# Altium footprint library WR-TBL_Pluggable Connector_3.81mm.PcbLib: 201 footprints (part 7 of 13)
Each footprint in its own frame and in the unit in brackets; x right, y up, seen from the top. Pads: shape width x height; smd on the part's side, far side on the other; paste and mask are expansions set on the pad; w line width, h text height; cw(c..) or ccw(c..) is an arc to the next point about the centre after c.
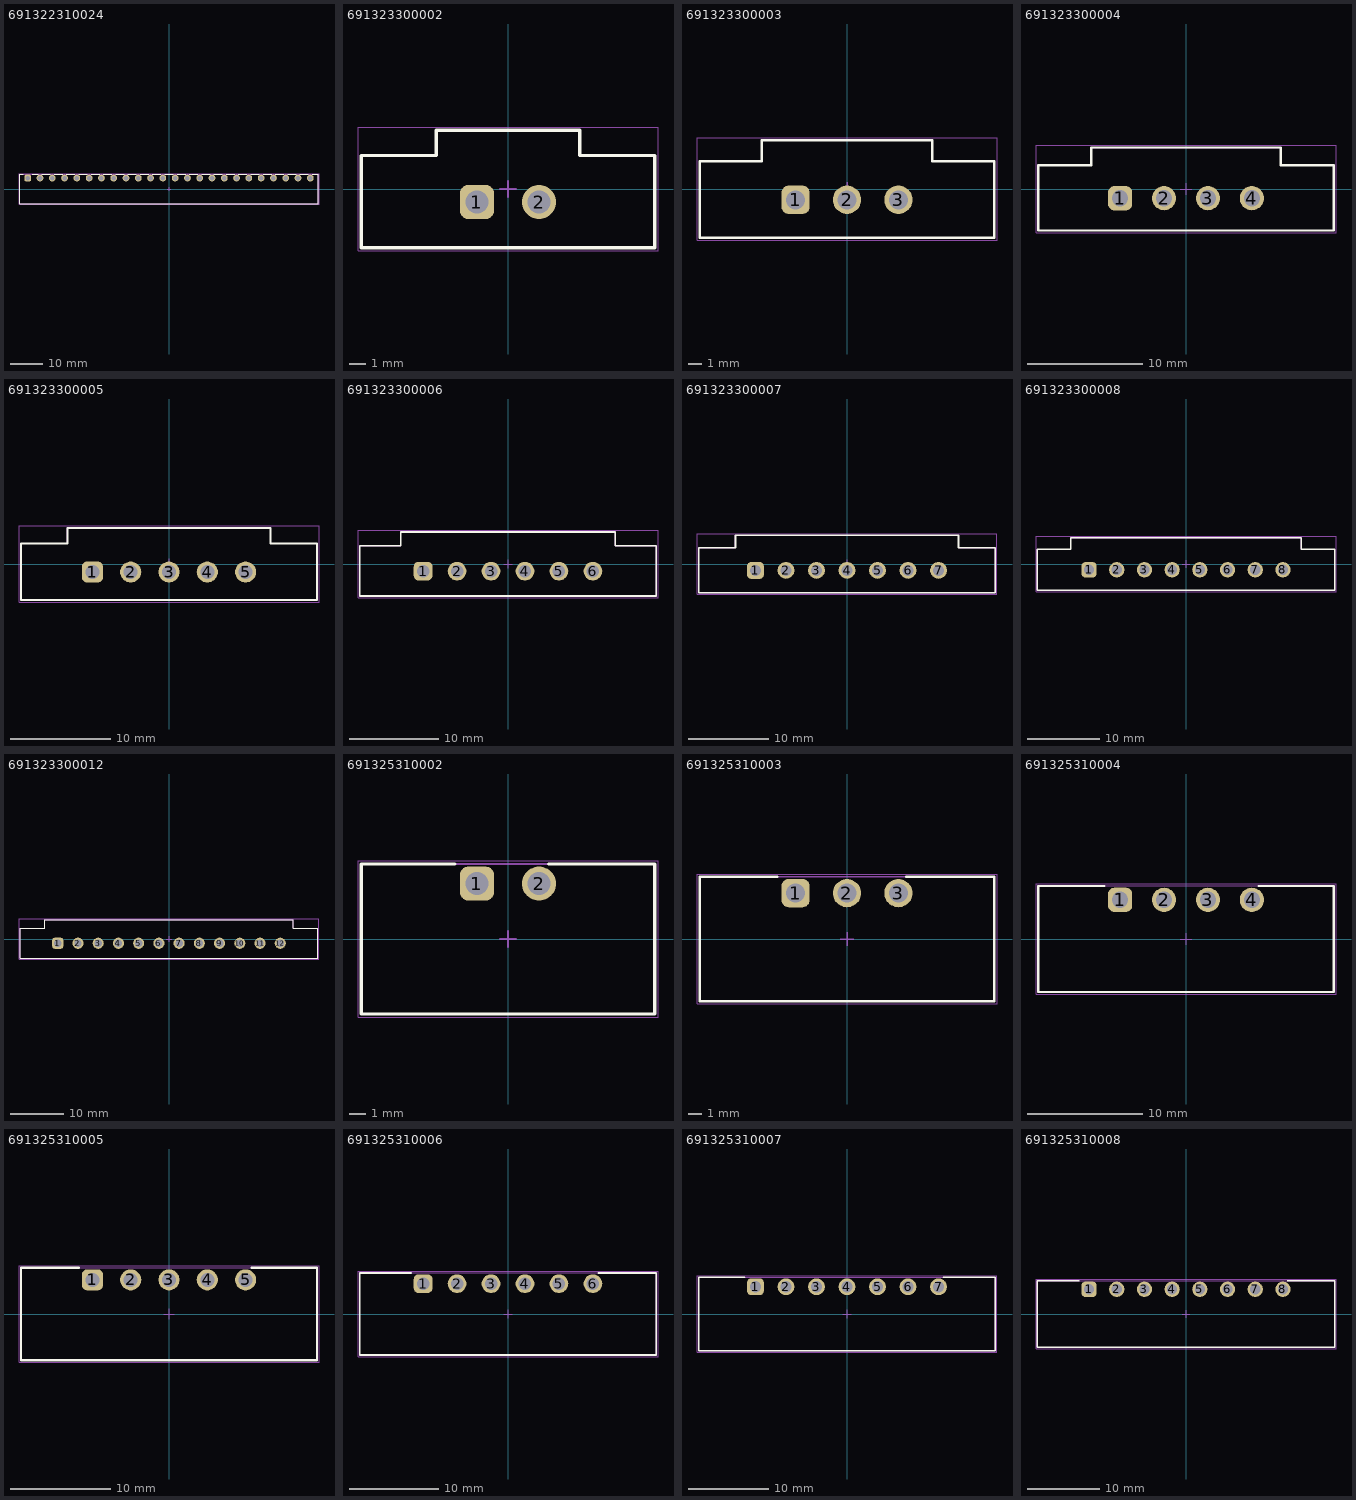
[diagram p6: the footprints below, top view; thin cyan lines are the x and y axes]

## 691322310024 [mm] "Horizontal PCB Header, pitch 3.81mm, 24p"
height 7
pads (24):
  rrect50% 2.1x2.1 hole 1.4: 1(-43.815,3.4)
  round 2.1 hole 1.4: 2(-40.005,3.4) 3(-36.195,3.4) 4(-32.385,3.4) 5(-28.575,3.4) 6(-24.765,3.4) 7(-20.955,3.4) 8(-17.145,3.4) 9(-13.335,3.4) 10(-9.525,3.4) 11(-5.715,3.4) 12(-1.905,3.4) 13(1.905,3.4) 14(5.715,3.4) 15(9.525,3.4) 16(13.335,3.4) 17(17.145,3.4) 18(20.955,3.4) 19(24.765,3.4) 20(28.575,3.4) 21(32.385,3.4) 22(36.195,3.4) 23(40.005,3.4) 24(43.815,3.4)
Top Overlay:
  lines w0.2: -45.165,4.6 -46.315,4.6 -46.315,-4.6 46.315,-4.6 46.315,4.6 44.405,4.6 ; -42.465,4.6 -40.595,4.6 ; -39.415,4.6 -36.785,4.6 ; -35.605,4.6 -32.975,4.6 ; -31.795,4.6 -29.165,4.6 ; -27.985,4.6 -25.355,4.6 ; -24.175,4.6 -21.545,4.6 ; -20.365,4.6 -17.735,4.6 ; -16.555,4.6 -13.925,4.6 ; -12.745,4.6 -10.115,4.6 ; -8.935,4.6 -6.305,4.6 ; -5.125,4.6 -2.495,4.6 ; -1.315,4.6 1.315,4.6 ; 2.495,4.6 5.125,4.6 ; 6.305,4.6 8.935,4.6 ; 10.115,4.6 12.745,4.6 ; 13.925,4.6 16.555,4.6 ; 17.735,4.6 20.365,4.6 ; 21.545,4.6 24.175,4.6 ; 25.355,4.6 27.985,4.6 ; 29.165,4.6 31.795,4.6 ; 32.975,4.6 35.605,4.6 ; 36.785,4.6 39.415,4.6 ; 40.595,4.6 43.225,4.6
Top Assembly:
  lines w0.1: -46.315,-4.6 46.315,-4.6 46.315,4.6 -46.315,4.6 -46.315,-4.6
Top Designator:
  text ".Designator" at -3.647,-0.357 h1
Top 3D Body:
  lines w0.1: -46.315,-4.6 -46.315,4.6 46.315,4.6 46.315,-4.6 -46.315,-4.6
Top Courtyard:
  lines w0.05: -46.515,-4.8 46.515,-4.8 46.515,4.8 -46.515,4.8 -46.515,-4.8
Top Component Center:
  lines w0.1: -0.5,0 0.5,0 ; 0,-0.5 0,0.5
3D body "691322310024.stp": height 7.25, standoff -3.45, extent -46.315,-4.6 46.315,4.6

## 691323300002 [mm] "Vertical PCB Header with Flanges, pitch 3.81mm, 02p"
height 9.2
pads (2):
  rrect50% 2.1x2.1 hole 1.4: 1(-1.905,-0.8)
  round 2.1 hole 1.4: 2(1.905,-0.8)
Top Overlay:
  lines w0.2: -9.005,-3.6 -9.005,2.05 -4.4,2.05 -4.4,3.6 4.4,3.6 4.4,2.05 9.005,2.05 9.005,-3.6 -9.005,-3.6
Top Assembly:
  lines w0.1: -9.005,-3.6 9.005,-3.6 9.005,2.05 4.4,2.05 4.4,3.6 -4.4,3.6 -4.4,2.05 -9.005,2.05 -9.005,-3.6
Top Designator:
  text ".Designator" at -3.647,-0.357 h1
Top 3D Body:
  lines w0.1: -9.005,-3.6 -9.005,2.05 -4.4,2.05 -4.4,3.6 4.4,3.6 4.4,2.05 9.005,2.05 9.005,-3.6 -9.005,-3.6
Top Courtyard:
  lines w0.05: -9.205,-3.8 -9.205,3.8 9.205,3.8 9.205,-3.8 -9.205,-3.8
Top Component Center:
  lines w0.1: -0.5,0 0.5,0 ; 0,-0.5 0,0.5
3D body "691323300002.stp": height 9.25, standoff -3.45, extent -9.005,-3.6 9.005,3.6

## 691323300003 [mm] "Vertical PCB Header with Flanges, pitch 3.81mm, 03p"
height 9.2
pads (3):
  rrect50% 2.1x2.1 hole 1.4: 1(-3.81,-0.8)
  round 2.1 hole 1.4: 2(0,-0.8) 3(3.81,-0.8)
Top Overlay:
  lines w0.2: -10.91,-3.6 10.91,-3.6 10.91,2.05 6.305,2.05 6.305,3.6 -6.305,3.6 -6.305,2.05 -10.91,2.05 -10.91,-3.6
Top Assembly:
  lines w0.1: -10.91,-3.6 -10.91,2.05 -6.305,2.05 -6.305,3.6 6.305,3.6 6.305,2.05 10.91,2.05 10.91,-3.6 -10.91,-3.6
Top Designator:
  text ".Designator" at -3.647,-0.357 h1
Top 3D Body:
  lines w0.1: -10.91,-3.6 10.91,-3.6 10.91,2.05 6.305,2.05 6.305,3.6 -6.305,3.6 -6.305,2.05 -10.91,2.05 -10.91,-3.6
Top Courtyard:
  lines w0.05: -11.11,-3.8 11.11,-3.8 11.11,3.8 -11.11,3.8 -11.11,-3.8
Top Component Center:
  lines w0.1: -0.5,0 0.5,0 ; 0,-0.5 0,0.5
3D body "691323300003.stp": height 9.25, standoff -3.45, extent -10.91,-3.6 10.91,3.6

## 691323300004 [mm] "Vertical PCB Header with Flanges, pitch 3.81mm, 04p"
height 9.2
pads (4):
  rrect50% 2.1x2.1 hole 1.4: 1(-5.715,-0.8)
  round 2.1 hole 1.4: 2(-1.905,-0.8) 3(1.905,-0.8) 4(5.715,-0.8)
Top Overlay:
  lines w0.2: -12.815,-3.6 12.815,-3.6 12.815,2.05 8.21,2.05 8.21,3.6 -8.21,3.6 -8.21,2.05 -12.815,2.05 -12.815,-3.6
Top Assembly:
  lines w0.1: -12.815,-3.6 -12.815,2.05 -8.21,2.05 -8.21,3.6 8.21,3.6 8.21,2.05 12.815,2.05 12.815,-3.6 -12.815,-3.6
Top Designator:
  text ".Designator" at -3.647,-0.357 h1
Top 3D Body:
  lines w0.1: -12.815,-3.6 12.815,-3.6 12.815,2.05 8.21,2.05 8.21,3.6 -8.21,3.6 -8.21,2.05 -12.815,2.05 -12.815,-3.6
Top Courtyard:
  lines w0.05: -13.015,-3.8 13.015,-3.8 13.015,3.8 -13.015,3.8 -13.015,-3.8
Top Component Center:
  lines w0.1: -0.5,0 0.5,0 ; 0,-0.5 0,0.5
3D body "691323300004.stp": height 9.25, standoff -3.45, extent -12.815,-3.6 12.815,3.6

## 691323300005 [mm] "Vertical PCB Header with Flanges, pitch 3.81mm, 05p"
height 9.2
pads (5):
  rrect50% 2.1x2.1 hole 1.4: 1(-7.62,-0.8)
  round 2.1 hole 1.4: 2(-3.81,-0.8) 3(0,-0.8) 4(3.81,-0.8) 5(7.62,-0.8)
Top Overlay:
  lines w0.2: -14.72,-3.6 14.72,-3.6 14.72,2.05 10.115,2.05 10.115,3.6 -10.115,3.6 -10.115,2.05 -14.72,2.05 -14.72,-3.6
Top Assembly:
  lines w0.1: -14.72,-3.6 -14.72,2.05 -10.115,2.05 -10.115,3.6 10.115,3.6 10.115,2.05 14.72,2.05 14.72,-3.6 -14.72,-3.6
Top Designator:
  text ".Designator" at -3.647,-0.357 h1
Top 3D Body:
  lines w0.1: -14.72,-3.6 14.72,-3.6 14.72,2.05 10.115,2.05 10.115,3.6 -10.115,3.6 -10.115,2.05 -14.72,2.05 -14.72,-3.6
Top Courtyard:
  lines w0.05: -14.92,-3.8 14.92,-3.8 14.92,3.8 -14.92,3.8 -14.92,-3.8
Top Component Center:
  lines w0.1: -0.5,0 0.5,0 ; 0,-0.5 0,0.5
3D body "691323300005.stp": height 9.25, standoff -3.45, extent -14.72,-3.6 14.72,3.6

## 691323300006 [mm] "Vertical PCB Header with Flanges, pitch 3.81mm, 06p"
height 9.2
pads (6):
  rrect50% 2.1x2.1 hole 1.4: 1(-9.525,-0.8)
  round 2.1 hole 1.4: 2(-5.715,-0.8) 3(-1.905,-0.8) 4(1.905,-0.8) 5(5.715,-0.8) 6(9.525,-0.8)
Top Overlay:
  lines w0.2: -16.625,-3.6 16.625,-3.6 16.625,2.05 12.02,2.05 12.02,3.6 -12.02,3.6 -12.02,2.05 -16.625,2.05 -16.625,-3.6
Top Assembly:
  lines w0.1: -16.625,-3.6 -16.625,2.05 -12.02,2.05 -12.02,3.6 12.02,3.6 12.02,2.05 16.625,2.05 16.625,-3.6 -16.625,-3.6
Top Designator:
  text ".Designator" at -3.647,-0.357 h1
Top 3D Body:
  lines w0.1: -16.625,-3.6 16.625,-3.6 16.625,2.05 12.02,2.05 12.02,3.6 -12.02,3.6 -12.02,2.05 -16.625,2.05 -16.625,-3.6
Top Courtyard:
  lines w0.05: -16.825,-3.8 16.825,-3.8 16.825,3.8 -16.825,3.8 -16.825,-3.8
Top Component Center:
  lines w0.1: -0.5,0 0.5,0 ; 0,-0.5 0,0.5
3D body "691323300006.stp": height 9.25, standoff -3.45, extent -16.625,-3.6 16.625,3.6

## 691323300007 [mm] "Vertical PCB Header with Flanges, pitch 3.81mm, 07p"
height 9.2
pads (7):
  rrect50% 2.1x2.1 hole 1.4: 1(-11.43,-0.8)
  round 2.1 hole 1.4: 2(-7.62,-0.8) 3(-3.81,-0.8) 4(0,-0.8) 5(3.81,-0.8) 6(7.62,-0.8) 7(11.43,-0.8)
Top Overlay:
  lines w0.2: -18.53,-3.6 18.53,-3.6 18.53,2.05 13.925,2.05 13.925,3.6 -13.925,3.6 -13.925,2.05 -18.53,2.05 -18.53,-3.6
Top Assembly:
  lines w0.1: -18.53,-3.6 -18.53,2.05 -13.925,2.05 -13.925,3.6 13.925,3.6 13.925,2.05 18.53,2.05 18.53,-3.6 -18.53,-3.6
Top Designator:
  text ".Designator" at -3.647,-0.357 h1
Top 3D Body:
  lines w0.1: -18.53,-3.6 18.53,-3.6 18.53,2.05 13.925,2.05 13.925,3.6 -13.925,3.6 -13.925,2.05 -18.53,2.05 -18.53,-3.6
Top Courtyard:
  lines w0.05: -18.73,-3.8 18.73,-3.8 18.73,3.8 -18.73,3.8 -18.73,-3.8
Top Component Center:
  lines w0.1: -0.5,0 0.5,0 ; 0,-0.5 0,0.5
3D body "691323300007.stp": height 9.25, standoff -3.45, extent -18.53,-3.6 18.53,3.6

## 691323300008 [mm] "Vertical PCB Header with Flanges, pitch 3.81mm, 08p"
height 9.2
pads (8):
  rrect50% 2.1x2.1 hole 1.4: 1(-13.335,-0.8)
  round 2.1 hole 1.4: 2(-9.525,-0.8) 3(-5.715,-0.8) 4(-1.905,-0.8) 5(1.905,-0.8) 6(5.715,-0.8) 7(9.525,-0.8) 8(13.335,-0.8)
Top Overlay:
  lines w0.2: -20.435,-3.6 -20.435,2.05 -15.83,2.05 -15.83,3.6 15.83,3.6 15.83,2.05 20.435,2.05 20.435,-3.6 -20.435,-3.6
Top Assembly:
  lines w0.1: -20.435,-3.6 20.435,-3.6 20.435,2.05 15.83,2.05 15.83,3.6 -15.83,3.6 -15.83,2.05 -20.435,2.05 -20.435,-3.6
Top Designator:
  text ".Designator" at -3.647,-0.357 h1
Top 3D Body:
  lines w0.1: -20.435,-3.6 -20.435,2.05 -15.83,2.05 -15.83,3.6 15.83,3.6 15.83,2.05 20.435,2.05 20.435,-3.6 -20.435,-3.6
Top Courtyard:
  lines w0.05: -20.635,-3.8 -20.635,3.8 20.635,3.8 20.635,-3.8 -20.635,-3.8
Top Component Center:
  lines w0.1: -0.5,0 0.5,0 ; 0,-0.5 0,0.5
3D body "691323300008.stp": height 9.25, standoff -3.45, extent -20.435,-3.6 20.435,3.6

## 691323300012 [mm] "Vertical PCB Header with Flanges, pitch 3.81mm, 12p"
height 9.2
pads (12):
  rrect50% 2.1x2.1 hole 1.4: 1(-20.955,-0.8)
  round 2.1 hole 1.4: 2(-17.145,-0.8) 3(-13.335,-0.8) 4(-9.525,-0.8) 5(-5.715,-0.8) 6(-1.905,-0.8) 7(1.905,-0.8) 8(5.715,-0.8) 9(9.525,-0.8) 10(13.335,-0.8) 11(17.145,-0.8) 12(20.955,-0.8)
Top Overlay:
  lines w0.2: -28.055,-3.6 -28.055,2.05 -23.45,2.05 -23.45,3.6 23.45,3.6 23.45,2.05 28.055,2.05 28.055,-3.6 -28.055,-3.6
Top Assembly:
  lines w0.1: -28.055,-3.6 28.055,-3.6 28.055,2.05 23.45,2.05 23.45,3.6 -23.45,3.6 -23.45,2.05 -28.055,2.05 -28.055,-3.6
Top Designator:
  text ".Designator" at -3.647,-0.357 h1
Top 3D Body:
  lines w0.1: -28.055,-3.6 -28.055,2.05 -23.45,2.05 -23.45,3.6 23.45,3.6 23.45,2.05 28.055,2.05 28.055,-3.6 -28.055,-3.6
Top Courtyard:
  lines w0.05: -28.255,-3.8 -28.255,3.8 28.255,3.8 28.255,-3.8 -28.255,-3.8
Top Component Center:
  lines w0.1: -0.5,0 0.5,0 ; 0,-0.5 0,0.5
3D body "691323300012.stp": height 9.25, standoff -3.45, extent -28.055,-3.6 28.055,3.6

## 691325310002 [mm] "Horizontal PCB Header with Flanges, pitch 3.81mm, 02p"
height 7
pads (2):
  rrect50% 2.1x2.1 hole 1.4: 1(-1.905,3.4)
  round 2.1 hole 1.4: 2(1.905,3.4)
Top Overlay:
  lines w0.2: -3.255,4.6 -9.005,4.6 -9.005,-4.6 9.005,-4.6 9.005,4.6 2.495,4.6
Top Assembly:
  lines w0.1: -9.005,-4.6 -9.005,4.6 9.005,4.6 9.005,-4.6 -9.005,-4.6
Top Designator:
  text ".Designator" at -3.647,-0.357 h1
Top 3D Body:
  lines w0.1: -9.005,-4.6 9.005,-4.6 9.005,4.6 -9.005,4.6 -9.005,-4.6
Top Courtyard:
  lines w0.05: -9.205,-4.8 9.205,-4.8 9.205,4.8 -9.205,4.8 -9.205,-4.8
Top Component Center:
  lines w0.1: -0.5,0 0.5,0 ; 0,-0.5 0,0.5
3D body "691325310002.stp": height 7.3, standoff -3.4, extent -9.005,-4.6 9.005,4.6

## 691325310003 [mm] "Horizontal PCB Header with Flanges, pitch 3.81mm, 03p"
height 7
pads (3):
  rrect50% 2.1x2.1 hole 1.4: 1(-3.81,3.4)
  round 2.1 hole 1.4: 2(0,3.4) 3(3.81,3.4)
Top Overlay:
  lines w0.2: -5.16,4.6 -10.91,4.6 -10.91,-4.6 10.91,-4.6 10.91,4.6 4.4,4.6
Top Assembly:
  lines w0.1: -10.91,-4.6 -10.91,4.6 10.91,4.6 10.91,-4.6 -10.91,-4.6
Top Designator:
  text ".Designator" at -3.647,-0.357 h1
Top 3D Body:
  lines w0.1: -10.91,-4.6 10.91,-4.6 10.91,4.6 -10.91,4.6 -10.91,-4.6
Top Courtyard:
  lines w0.05: -11.11,-4.8 11.11,-4.8 11.11,4.8 -11.11,4.8 -11.11,-4.8
Top Component Center:
  lines w0.1: -0.5,0 0.5,0 ; 0,-0.5 0,0.5
3D body "691325310003.stp": height 7.3, standoff -3.4, extent -10.91,-4.6 10.91,4.6

## 691325310004 [mm] "Horizontal PCB Header with Flanges, pitch 3.81mm, 04p"
height 7
pads (4):
  rrect50% 2.1x2.1 hole 1.4: 1(-5.715,3.4)
  round 2.1 hole 1.4: 2(-1.905,3.4) 3(1.905,3.4) 4(5.715,3.4)
Top Overlay:
  lines w0.2: -7.065,4.6 -12.815,4.6 -12.815,-4.6 12.815,-4.6 12.815,4.6 6.305,4.6
Top Assembly:
  lines w0.1: -12.815,-4.6 -12.815,4.6 12.815,4.6 12.815,-4.6 -12.815,-4.6
Top Designator:
  text ".Designator" at -3.647,-0.357 h1
Top 3D Body:
  lines w0.1: -12.815,-4.6 12.815,-4.6 12.815,4.6 -12.815,4.6 -12.815,-4.6
Top Courtyard:
  lines w0.05: -13.015,-4.8 13.015,-4.8 13.015,4.8 -13.015,4.8 -13.015,-4.8
Top Component Center:
  lines w0.1: -0.5,0 0.5,0 ; 0,-0.5 0,0.5
3D body "691325310004.stp": height 7.3, standoff -3.4, extent -12.815,-4.6 12.815,4.6

## 691325310005 [mm] "Horizontal PCB Header with Flanges, pitch 3.81mm, 05p"
height 7
pads (5):
  rrect50% 2.1x2.1 hole 1.4: 1(-7.62,3.4)
  round 2.1 hole 1.4: 2(-3.81,3.4) 3(0,3.4) 4(3.81,3.4) 5(7.62,3.4)
Top Overlay:
  lines w0.2: -8.97,4.6 -14.72,4.6 -14.72,-4.6 14.72,-4.6 14.72,4.6 8.21,4.6
Top Assembly:
  lines w0.1: -14.72,-4.6 -14.72,4.6 14.72,4.6 14.72,-4.6 -14.72,-4.6
Top Designator:
  text ".Designator" at -3.647,-0.357 h1
Top 3D Body:
  lines w0.1: -14.72,-4.6 14.72,-4.6 14.72,4.6 -14.72,4.6 -14.72,-4.6
Top Courtyard:
  lines w0.05: -14.92,-4.8 14.92,-4.8 14.92,4.8 -14.92,4.8 -14.92,-4.8
Top Component Center:
  lines w0.1: -0.5,0 0.5,0 ; 0,-0.5 0,0.5
3D body "691325310005.stp": height 7.3, standoff -3.4, extent -14.72,-4.6 14.72,4.6

## 691325310006 [mm] "Horizontal PCB Header with Flanges, pitch 3.81mm, 06p"
height 7
pads (6):
  rrect50% 2.1x2.1 hole 1.4: 1(-9.525,3.4)
  round 2.1 hole 1.4: 2(-5.715,3.4) 3(-1.905,3.4) 4(1.905,3.4) 5(5.715,3.4) 6(9.525,3.4)
Top Overlay:
  lines w0.2: -10.875,4.6 -16.625,4.6 -16.625,-4.6 16.625,-4.6 16.625,4.6 10.115,4.6
Top Assembly:
  lines w0.1: -16.625,-4.6 -16.625,4.6 16.625,4.6 16.625,-4.6 -16.625,-4.6
Top Designator:
  text ".Designator" at -3.647,-0.357 h1
Top 3D Body:
  lines w0.1: -16.625,-4.6 16.625,-4.6 16.625,4.6 -16.625,4.6 -16.625,-4.6
Top Courtyard:
  lines w0.05: -16.825,-4.8 16.825,-4.8 16.825,4.8 -16.825,4.8 -16.825,-4.8
Top Component Center:
  lines w0.1: -0.5,0 0.5,0 ; 0,-0.5 0,0.5
3D body "691325310006.stp": height 7.3, standoff -3.4, extent -16.625,-4.6 16.625,4.6

## 691325310007 [mm] "Horizontal PCB Header with Flanges, pitch 3.81mm, 07p"
height 7
pads (7):
  rrect50% 2.1x2.1 hole 1.4: 1(-11.43,3.4)
  round 2.1 hole 1.4: 2(-7.62,3.4) 3(-3.81,3.4) 4(0,3.4) 5(3.81,3.4) 6(7.62,3.4) 7(11.43,3.4)
Top Overlay:
  lines w0.2: -12.78,4.6 -18.53,4.6 -18.53,-4.6 18.53,-4.6 18.53,4.6 12.02,4.6
Top Assembly:
  lines w0.1: -18.53,-4.6 -18.53,4.6 18.53,4.6 18.53,-4.6 -18.53,-4.6
Top Designator:
  text ".Designator" at -3.647,-0.357 h1
Top 3D Body:
  lines w0.1: -18.53,-4.6 18.53,-4.6 18.53,4.6 -18.53,4.6 -18.53,-4.6
Top Courtyard:
  lines w0.05: -18.73,-4.8 18.73,-4.8 18.73,4.8 -18.73,4.8 -18.73,-4.8
Top Component Center:
  lines w0.1: -0.5,0 0.5,0 ; 0,-0.5 0,0.5
3D body "691325310007.stp": height 7.3, standoff -3.4, extent -18.53,-4.6 18.53,4.6

## 691325310008 [mm] "Horizontal PCB Header with Flanges, pitch 3.81mm, 08p"
height 7
pads (8):
  rrect50% 2.1x2.1 hole 1.4: 1(-13.335,3.4)
  round 2.1 hole 1.4: 2(-9.525,3.4) 3(-5.715,3.4) 4(-1.905,3.4) 5(1.905,3.4) 6(5.715,3.4) 7(9.525,3.4) 8(13.335,3.4)
Top Overlay:
  lines w0.2: -14.685,4.6 -20.435,4.6 -20.435,-4.6 20.435,-4.6 20.435,4.6 13.925,4.6
Top Assembly:
  lines w0.1: -20.435,-4.6 -20.435,4.6 20.435,4.6 20.435,-4.6 -20.435,-4.6
Top Designator:
  text ".Designator" at -3.647,-0.357 h1
Top 3D Body:
  lines w0.1: -20.435,-4.6 20.435,-4.6 20.435,4.6 -20.435,4.6 -20.435,-4.6
Top Courtyard:
  lines w0.05: -20.635,-4.8 20.635,-4.8 20.635,4.8 -20.635,4.8 -20.635,-4.8
Top Component Center:
  lines w0.1: -0.5,0 0.5,0 ; 0,-0.5 0,0.5
3D body "691325310008.stp": height 7.3, standoff -3.4, extent -20.435,-4.6 20.435,4.6